# Altium schematic symbol library Centralize.SchLib: 1081 symbols (part 13 of 26)
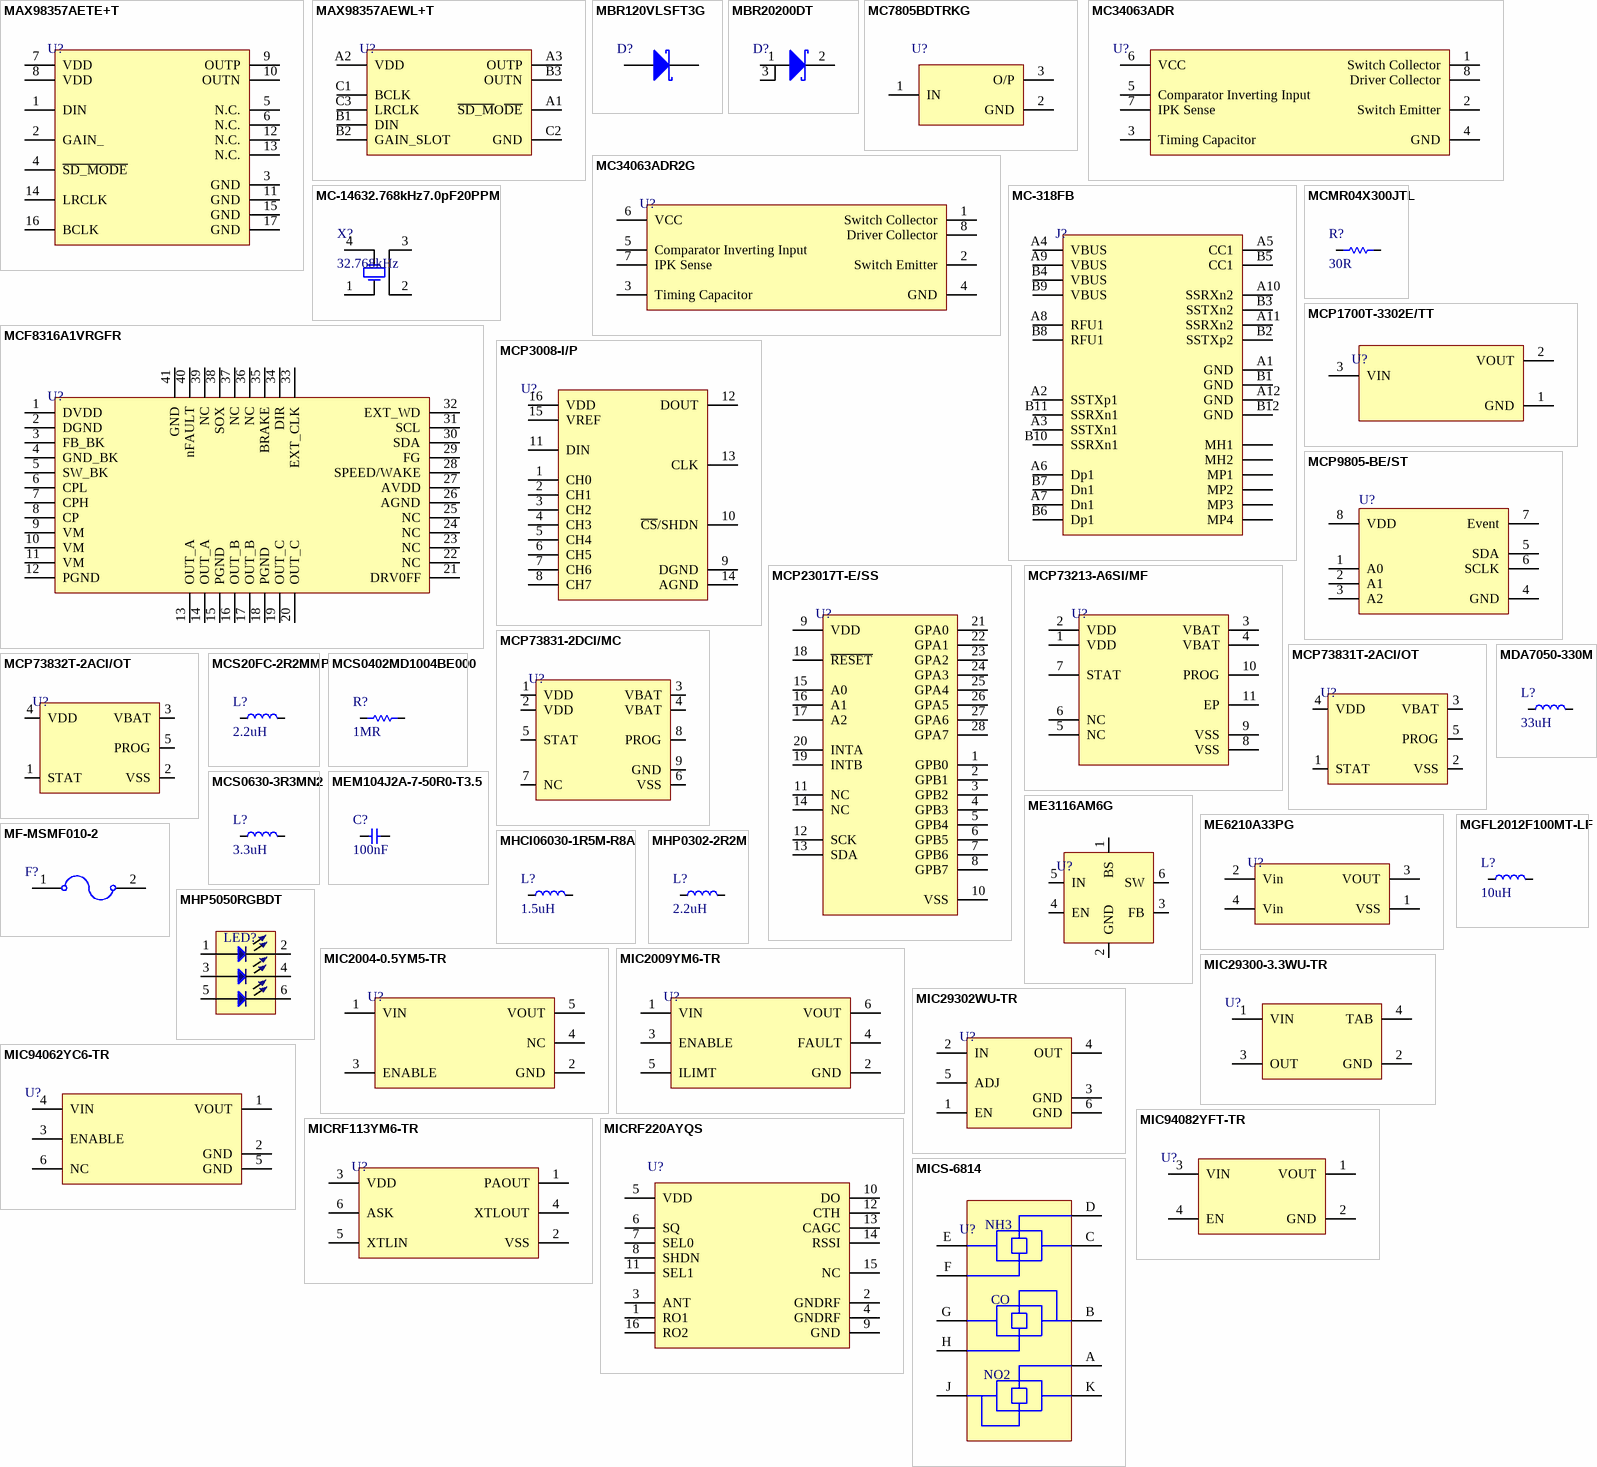
[diagram p59: symbols MAX98357AETE+T to MICS-6814]

## MICRF113YM6-TR
designator U?
SOT-23-6 RF Transceiver ICs ROHS; Manufacturer: Microchip; Manufacturer Part Number: MICRF113YM6-TR; Frequency: 450MHz; Data Rate: 10Kbps; Nominal Supply Current: 12.5mA; Max Supply Voltage: 3.6V; Min Supply Voltage: 1.8V; Operating Frequency: 300 MHz to 450 MHz; Output Power (dBm): 10dBm; Supplier 1: Future Electronics; RoHS: Yes; Category: Interface ICs; Stock 1: 12000; Pricing 1: 3000=0.90500 (USD); Case/Package: SOT-23-6; Number of Pins: 6; Min Operating Temperature: -40°C; Max Operating Temperature: 85°C; Package Quantity: 3000; Packaging: Tape and Reel; Current - Transmitting: 12.5mA; Series: -; Supply Current: 12.5mA; Radiation Hardening: No; RoHS Compliant: Yes; ComponentLink1URL: https://datasheet.ciiva.com/2802/micrf113-2802309.pdf?src-supplier=Digi-Key; ComponentLink1Description: https://datasheet.ciiva.com/2802/micrf113-2802309.pdf?src-supplier=Digi-Key; ComponentLink2URL: https://datasheet.ciiva.com/26913/getdatasheetpartid-313552-26913166.pdf?src-supplier=Verical; ComponentLink2Description: https://datasheet.ciiva.com/26913/getdatasheetpartid-313552-26913166.pdf?src-supplier=Verical; ComponentLink3URL: https://datasheet.ciiva.com/2802/micrf113-2802310.pdf?src-supplier=Digi-Key; ComponentLink3Description: https://datasheet.ciiva.com/2802/micrf113-2802310.pdf?src-supplier=Digi-Key; ComponentLink4URL: https://datasheet.ciiva.com/2802/micrf113-2802311.pdf?src-supplier=Digi-Key; ComponentLink4Description: https://datasheet.ciiva.com/2802/micrf113-2802311.pdf?src-supplier=Digi-Key; ComponentLink5URL: https://datasheet.ciiva.com/16217/micrf113-16217142.pdf?src-supplier=Future+Electronics; ComponentLink5Description: https://datasheet.ciiva.com/16217/micrf113-16217142.pdf?src-supplier=Future+Electronics; Supplier Part Number 1: 8229866; LCSC Part Number: C481380
footprint SOT-23-6
pins: 1 PAOUT, 2 VSS, 3 VDD, 4 XTLOUT, 5 XTLIN, 6 ASK

## MICRF220AYQS
designator U?
RF RX ASK/OOK 300-450MHZ 16QSOP; Manufacturer: Microchip; Manufacturer Part Number: MICRF220AYQS; Data Rate: 20Kbps; Nominal Supply Current: 4.3mA; Min Supply Voltage: 3V; Max Supply Voltage: 3.6V; Frequency: 450MHz; Sensitivity: -112.5dBm; Current - Receiving: 6mA; Bandwidth: 330kHz; Operating Frequency: 300 MHz to 450 MHz; Min Frequency: 300MHz; Item Type: IC; Supplier 1: Arrow Electronics; RoHS: Yes; Category: Interface ICs; Stock 1: 5131; Pricing 1: 1=2.15000 (USD); Mount: Surface Mount; Case/Package: QSOP; Number of Pins: 16; Min Operating Temperature: -40°C; Max Operating Temperature: 105°C; Package Quantity: 98; Packaging: Rail/Tube; Series: QwikRadio®; Supply Current: 4.3mA; Max Frequency: 450MHz; Length: 4.9mm; Width: 3.91mm; Height: 1.47mm; Depth: 3.91mm; Radiation Hardening: No; RoHS Compliant: Yes; REACH SVHC: No SVHC; Lead Free: Lead Free; ComponentLink1URL: https://datasheet.ciiva.com/2798/micrf220-2798468.pdf?src-supplier=Digi-Key; ComponentLink1Description: https://datasheet.ciiva.com/2798/micrf220-2798468.pdf?src-supplier=Digi-Key; ComponentLink2URL: https://datasheet.ciiva.com/30475/0900766b81133813-30475820.pdf?src-supplier=RSComponents; ComponentLink2Description: https://datasheet.ciiva.com/30475/0900766b81133813-30475820.pdf?src-supplier=RSComponents; ComponentLink3URL: https://datasheet.ciiva.com/1164/micrf220-1164232.pdf?src-supplier=Element14; ComponentLink3Description: https://datasheet.ciiva.com/1164/micrf220-1164232.pdf?src-supplier=Element14; Supplier Part Number 1: MICRF220AYQS; LCSC Part Number: C219772; ComponentLink4Description: LCSC; ComponentLink4URL: https://www.lcsc.com/product-detail/RF-Transceiver-ICs_Microchip-Tech-MICRF220AYQS_C219772.html
footprint 16-QSOP_
pins: 1 RO1, 2 GNDRF, 3 ANT, 4 GNDRF, 5 VDD, 6 SQ, 7 SEL0, 8 SHDN, 9 GND, 10 DO, 11 SEL1, 12 CTH, 13 CAGC, 14 RSSI, 15 NC, 16 RO2

## MICS-6814
designator U?
CO/NO2/NH3 Triple Gas Sensor Metaloxide Gas Detection Sensor SMD T/R; Manufacturer: Amphenol; Item Type: (CO) Sensor; Supplier 1: Arrow Electronics; Manufacturer Part Number: MICS-6814; RoHS: No; Category: Sensors; Stock 1: 100; Pricing 1: 1=10.8025, 10=10.7911 (USD); Supplier Part Number 1: MICS-6814; LCSC Part Number: C3659383
footprint MICS-6814
pins: A Rs2, B Rh1 RED/Rs1 RED, C Rh1 NH3, D Rs1 NH3, E Rh2 NH3, F Rs2 NH3, G Rh2 RED, H Rs2 RED, J Rh1 OX/Rs1 OX, K Rh2 OX
text: NH3; CO; NO2

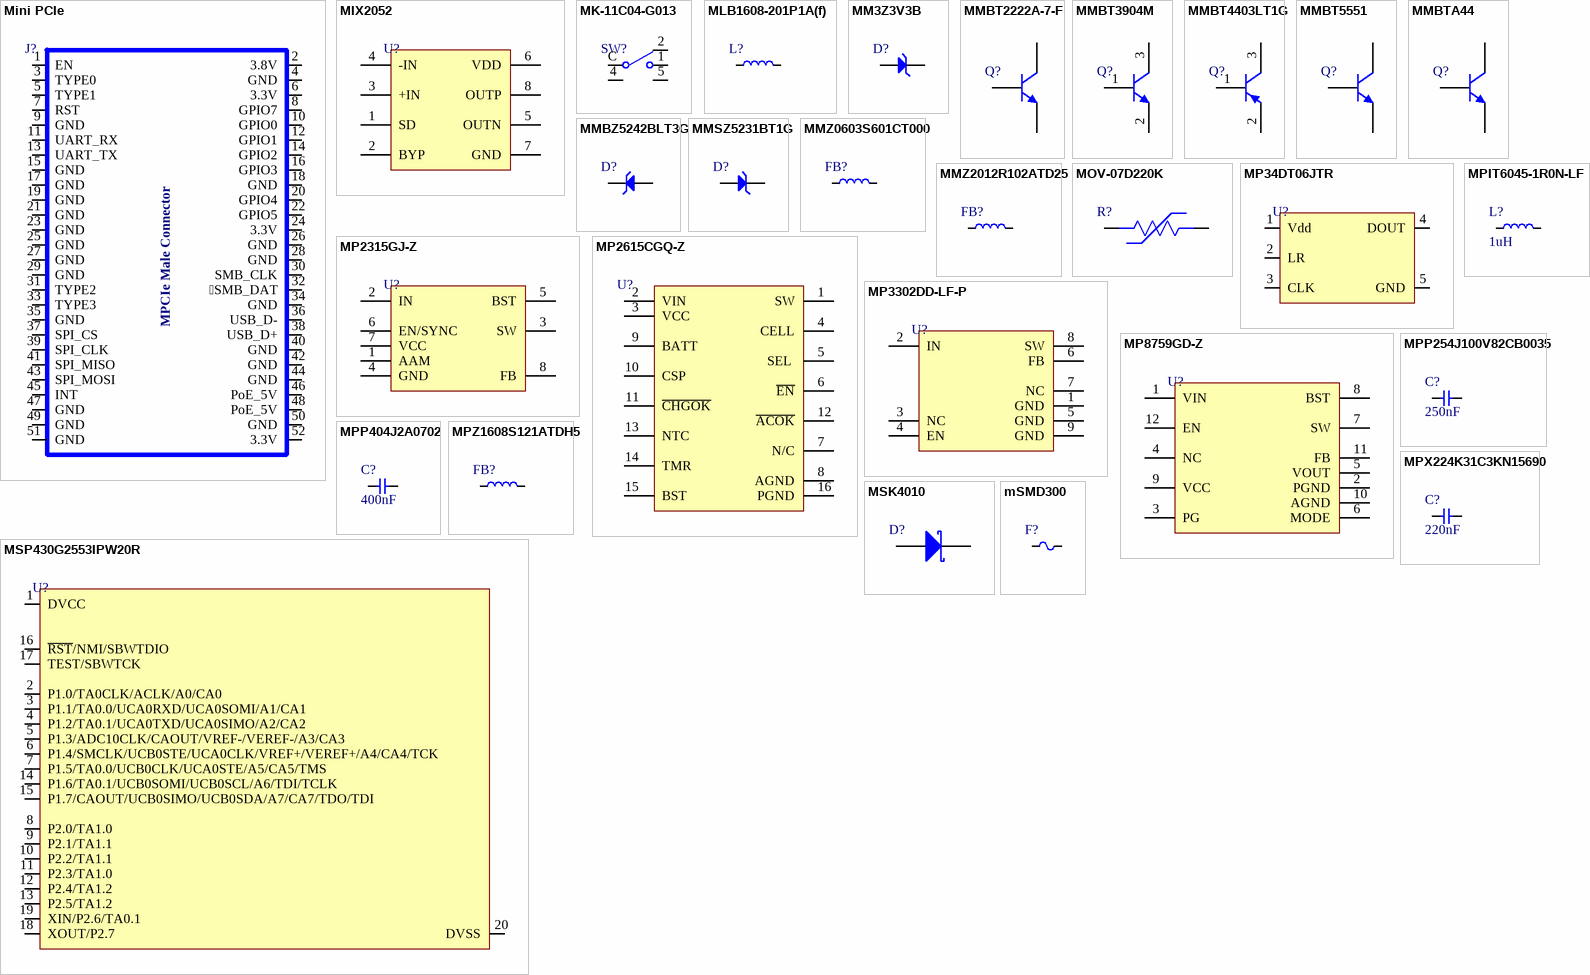
[diagram p16: symbols Mini PCIe to MSP430G2553IPW20R]

## Mini PCIe
designator J?
PCI Express Mini Card (Mini PCIe)
footprint Mini PCIE Pad
pins: 1 EN, 2 3.8V, 3 TYPE0, 4 GND, 5 TYPE1, 6 3.3V, 7 RST, 8 GPIO7, 9 GND, 10 GPIO0, 11 UART_RX, 12 GPIO1, 13 UART_TX, 14 GPIO2, 15 GND, 16 GPIO3, 17 GND, 18 GND, 19 GND, 20 GPIO4, 21 GND, 22 GPIO5, 23 GND, 24 3.3V, 25 GND, 26 GND, 27 GND, 28 GND, 29 GND, 30 SMB_CLK, 31 TYPE2, 32 SMB_DAT, 33 TYPE3, 34 GND, 35 GND, 36 USB_D-, 37 SPI_CS, 38 USB_D+, 39 SPI_CLK, 40 GND, 41 SPI_MISO, 42 GND, 43 SPI_MOSI, 44 GND, 45 INT, 46 PoE_5V, 47 GND, 48 PoE_5V, 49 GND, 50 GND, 51 GND, 52 3.3V
text: MPCIe Male Connector

## MIX2052
designator U?
SOP-8 Audio Power OpAmps ROHS; Manufacturer: MIXINNO; Manufacturer Part Number: MIX2052; Item Type: IC; Package: SOP-8; LCSC Part Number: C427090; ComponentLink1Description: LCSC; ComponentLink1URL: https://www.lcsc.com/product-detail/Audio-Power-OpAmps_MIXINNO-MIX2052_C427090.html
footprint SOP-8
pins: 1 SD, 2 BYP, 3 +IN, 4 -IN , 5 OUTN, 6 VDD, 7 GND, 8 OUTP

## MK-11C04-G013
designator SW?
Surface Mount 1A SPDT 6V Black 10000次 SMD Slide Switches ROHS; Manufacturer: G-Switch; Manufacturer Part Number: MK-11C04-G013; Package: SMD; LCSC Part Number: C778185; Item Type: Slide Switche; ComponentLink1Description: LCSC; ComponentLink1URL: https://www.lcsc.com/product-detail/Slide-Switches_G-Switch-MK-11C04-G013_C778185.html
footprint MK-11C04-G013
pins: 1, 2, 4 MP, 5 MP, C

## MLB1608-201P1A(f)
designator L?
200Ω @ 100MHz 1 1A 300mΩ 0603 Ferrite Beads; Manufacturer: Meled; Manufacturer Part Number: MLB1608-201P1A(f); Number of Lines: 1; Impedance @ Frequency: 200Ω @ 100MHz; Current Rating (Max): 1A; DC Resistance (DCR) (Max): 300mΩ; ComponentLink1Description: LCSC; ComponentLink1URL: https://www.lcsc.com/product-detail/Ferrite-Beads_Meled-MLB1608-201P1A-f_C45316.html; LCSC Part Number: C45316
footprint IND-0603 (1608 Metric) (0.063" L x 0.032" W (1.60mm x 0.80mm))
pins: 1, 2

## MM3Z3V3B
designator D?
DIODE ZENER 3.3V 200MW SOD323F; Manufacturer: ON Semiconductor / Fairchild; Manufacturer Part Number: MM3Z3V3B; Forward Voltage: 1V; Tolerance: 2%; Impedance: 89R; Max Reverse Leakage Current: 4.5uA; Test Current: 5mA; Element Configuration: Single; Supplier 1: Digi-Key; Stock 1: 473644; Pricing 1: 1=0.22, 10=0.18, 100=0.0956, 500=0.06288, 1000=0.04276 (USD); Mount: Surface Mount; Number of Pins: 2; Weight: 0.0276g; Min Operating Temperature: -65°C; Max Operating Temperature: 150°C; Packaging: Tape and Reel; Package Quantity: 1; Max Power Dissipation: 200mW; Zener Voltage: 3.3V; Voltage Tolerance: 2%; Power Dissipation: 200mW; Working Voltage: 3.3V; Peak Reverse Current: 4.5uA; Length: 1.3mm; Height: 1mm; Width: 1.7mm; Radiation Hardening: No; REACH SVHC: No SVHC; Lead Free: Lead Free; ComponentLink1URL: http://www.onsemi.com/pub/Collateral/MM3Z9V1B-D.pdf?src-supplier=Digi-Key; ComponentLink1Description: http://www.onsemi.com/pub/Collateral/MM3Z9V1B-D.pdf?src-supplier=Digi-Key; ComponentLink2URL: http://www.mouser.com/ds/2/149/MM3Z3V3B-187166.pdf?src-supplier=Mouser; ComponentLink2Description: http://www.mouser.com/ds/2/149/MM3Z3V3B-187166.pdf?src-supplier=Mouser; ComponentLink3URL: https://www.fairchildsemi.com/datasheets/MM/MM3Z9V1B.pdf?src-supplier=Avnet; ComponentLink3Description: https://www.fairchildsemi.com/datasheets/MM/MM3Z9V1B.pdf?src-supplier=Avnet; ComponentLink4URL: http://www.farnell.com/datasheets/1706525.pdf?src-supplier=Element14; ComponentLink4Description: http://www.farnell.com/datasheets/1706525.pdf?src-supplier=Element14; Supplier Part Number 1: MM3Z3V3BCT-ND; LCSC Part Number: C2978865
footprint SOD323F
pins: 1 A, 2 K

## MMBT2222A-7-F
designator Q?
TRANS NPN 40V 0.6A SMD SOT23-3; Manufacturer: Diodes; Manufacturer Part Number: MMBT2222A-7-F; Max Power Dissipation: 300mW; Collector Base Voltage (VCBO): 75V; Max Collector Current: 600mA; hFE Min: 100; Frequency: 300MHz; Number of Elements: 1; Emitter Base Voltage (VEBO): 6V; Collector Emitter Saturation Voltage: 1V; Power Dissipation: 350mW; Element Configuration: Single; Current: 1A; Item Type: Mosfet; Supplier 1: Digi-Key; Stock 1: 2471182; Pricing 1: 1=0.15, 10=0.134, 100=0.0729, 500=0.04486, 1000=0.03059 (USD); Mount: Surface Mount; Case/Package: SOT-23; Number of Pins: 3; Weight: 0.000282oz; Contact Plating: Matte,Tin; Min Operating Temperature: -55°C; Max Operating Temperature: 150°C; Packaging: Tape and Reel; Collector Emitter Voltage (VCEO): 40V; Polarity: NPN; Voltage Rating (DC): 40V; Package Quantity: 3000; Continuous Collector Current: 600mA; Collector Emitter Breakdown Voltage: 40V; Transition Frequency: 300MHz; Max Breakdown Voltage: 40V; Max Frequency: 300MHz; Termination: SMD/SMT; Gain Bandwidth Product: 300MHz; Current Rating: 600mA; Voltage: 40V; Length: 3.05mm; Height: 1mm; Width: 1.4mm; Radiation Hardening: No; Lead Free: Lead Free; REACH SVHC: No SVHC; ComponentLink1URL: http://www.diodes.com/datasheets/ds30041.pdf?src-supplier=Future+Electronics; ComponentLink1Description: http://www.diodes.com/datasheets/ds30041.pdf?src-supplier=Future+Electronics; ComponentLink2URL: http://www.diodes.com/datasheets/ds30041.pdf?src-supplier=Avnet; ComponentLink2Description: http://www.diodes.com/datasheets/ds30041.pdf?src-supplier=Avnet; ComponentLink3URL: https://www.verical.com/server-webapp/html/getDatasheet?partID=82692&src-supplier=Verical; ComponentLink3Description: https://www.verical.com/server-webapp/html/getDatasheet?partID=82692&src-supplier=Verical; ComponentLink4URL: https://www.diodes.com/assets/Datasheets/ds30041.pdf?src-supplier=Digi-Key; ComponentLink4Description: https://www.diodes.com/assets/Datasheets/ds30041.pdf?src-supplier=Digi-Key; ComponentLink5URL: http://www.diodes.com/datasheets/ds30041.pdf?src-supplier=Avnet+Europe; ComponentLink5Description: http://www.diodes.com/datasheets/ds30041.pdf?src-supplier=Avnet+Europe; ComponentLink6URL: http://www.diodes.com/datasheets/ds30041.pdf?src-supplier=Element14; ComponentLink6Description: http://www.diodes.com/datasheets/ds30041.pdf?src-supplier=Element14; Supplier Part Number 1: MMBT2222A-FDIDKR-ND; LCSC Part Number: C94515
footprint SOT-23
pins: 1 B, 2 E, 3 C

## MMBT3904M
designator Q?
40V 100mW 100@10mA,1V 200mA 300MHz 300mV@50mA,5mA NPN -55℃~+150℃@(Tj) SOT-723 Bipolar Transistors - BJT ROHS; Manufacturer: TECH PUBLIC; Manufacturer Part Number: MMBT3904M; Item Type: Mosfet; ComponentLink1Description: LCSC; ComponentLink1URL: https://www.lcsc.com/product-detail/Bipolar-Transistors-BJT_TECH-PUBLIC-MMBT3904M_C2923360.html; Package: SOT-723; LCSC Part Number: C2923360
footprint SOT-723
pins: 1 B, 2 E, 3 C

## MMBT4403LT1G
designator Q?
TRANS PNP 40V 600MA SOT23-3; Manufacturer: ON Semiconductor; Manufacturer Part Number: MMBT4403LT1G; Max Power Dissipation: 300mW; hFE Min: 30; Emitter Base Voltage (VEBO): 5V; Transition Frequency: 200MHz; Collector Emitter Saturation Voltage: -750mV; Element Configuration: Single; Voltage Rating (DC): -40V; Current Rating: -600mA; Collector-emitter Voltage-Max: 750mV; Number of Elements: 1; ComponentLink1URL: http://www.onsemi.com/pub/Collateral/MMBT4403LT1-D.PDF?src-supplier=Avnet; ComponentLink1Description: http://www.onsemi.com/pub/Collateral/MMBT4403LT1-D.PDF?src-supplier=Avnet; ComponentLink2URL: http://www.onsemi.com/pub/Collateral/MMBT4403LT1-D.PDF?src-supplier=Digi-Key; ComponentLink2Description: http://www.onsemi.com/pub/Collateral/MMBT4403LT1-D.PDF?src-supplier=Digi-Key; Supplier 1: Avnet; RoHS: Yes; Category: BJTs; Stock 1: 25249; Pricing 1: 1=0.14200, 10=0.09900, 100=0.05400, 500=0.04300 (USD); Case/Package: SOT-23-3; Number of Pins: 3; Contact Plating: Tin,Matte; Min Operating Temperature: -55°C; Max Operating Temperature: 150°C; Packaging: Tape and Reel; Polarity: PNP; Collector Emitter Breakdown Voltage: 40V; Package Quantity: 1; Collector Emitter Voltage (VCEO): 40V; Max Collector Current: 600mA; Collector Base Voltage (VCBO): 40V; Power Dissipation: 300mW; Gain Bandwidth Product: 200MHz; Max Frequency: 200MHz; Series: -; Frequency: 200MHz; Max Breakdown Voltage: 40V; Length: 3.04mm; Width: 1.4mm; Height: 1.01mm; Radiation Hardening: No; Lead Free: Lead Free; REACH SVHC: No SVHC; RoHS Compliant: Yes; ComponentLink3URL: https://datasheet.ciiva.com/4722/mmbt4403lt1-d-101652-4722132.pdf?src-supplier=Mouser; ComponentLink3Description: https://datasheet.ciiva.com/4722/mmbt4403lt1-d-101652-4722132.pdf?src-supplier=Mouser; ComponentLink4URL: https://datasheet.ciiva.com/15138/getdatasheetpartid-44367-15138750.pdf?src-supplier=Verical; ComponentLink4Description: https://datasheet.ciiva.com/15138/getdatasheetpartid-44367-15138750.pdf?src-supplier=Verical; ComponentLink5URL: https://datasheet.ciiva.com/14546/70099534-14546501.pdf?src-supplier=Allied+Electronics; ComponentLink5Description: https://datasheet.ciiva.com/14546/70099534-14546501.pdf?src-supplier=Allied+Electronics; ComponentLink6URL: https://datasheet.ciiva.com/7972/mmbt4403lt1-d-7972391.pdf?src-supplier=Element14; ComponentLink6Description: https://datasheet.ciiva.com/7972/mmbt4403lt1-d-7972391.pdf?src-supplier=Element14; ComponentLink7URL: https://datasheet.ciiva.com/11198/mmbt4403lt1-d-11198713.pdf?src-supplier=Avnet; ComponentLink7Description: https://datasheet.ciiva.com/11198/mmbt4403lt1-d-11198713.pdf?src-supplier=Avnet; ComponentLink8URL: https://datasheet.ciiva.com/16478/mmbt4403lt1-d-16478554.pdf?src-supplier=Avnet+Asia; ComponentLink8Description: https://datasheet.ciiva.com/16478/mmbt4403lt1-d-16478554.pdf?src-supplier=Avnet+Asia; ComponentLink9URL: https://datasheet.ciiva.com/976/mmbt4403lt1-d-976347.pdf?src-supplier=Digi-Key; ComponentLink9Description: https://datasheet.ciiva.com/976/mmbt4403lt1-d-976347.pdf?src-supplier=Digi-Key; ComponentLink10URL: https://datasheet.ciiva.com/16396/mmbt4403lt1-d-16396635.pdf?src-supplier=Future+Electronics; ComponentLink10Description: https://datasheet.ciiva.com/16396/mmbt4403lt1-d-16396635.pdf?src-supplier=Future+Electronics; ComponentLink11URL: https://datasheet.ciiva.com/976/mmbt4403lt1-d-976348.pdf?src-supplier=Digi-Key; ComponentLink11Description: https://datasheet.ciiva.com/976/mmbt4403lt1-d-976348.pdf?src-supplier=Digi-Key; ComponentLink12URL: https://datasheet.ciiva.com/976/mmbt4403lt1-d-976349.pdf?src-supplier=Digi-Key; ComponentLink12Description: https://datasheet.ciiva.com/976/mmbt4403lt1-d-976349.pdf?src-supplier=Digi-Key; ComponentLink13URL: https://datasheet.ciiva.com/25998/mmbt4403lt1-d-25998110.pdf?src-supplier=Avnet+Europe; ComponentLink13Description: https://datasheet.ciiva.com/25998/mmbt4403lt1-d-25998110.pdf?src-supplier=Avnet+Europe; Supplier Part Number 1: 88H4792; LCSC Part Number: C78864
footprint sot-23
pins: 1 B, 2 E, 3 C

## MMBT5551
designator Q?
TRANS NPN 160V 0.6A SOT-23; Manufacturer: ON Semiconductor; Manufacturer Part Number: MMBT5551LT1G; Max Power Dissipation: 225mW; Max Collector Current: 600mA; Collector Base Voltage (VCBO): 180V; Emitter Base Voltage (VEBO): 6V; Element Configuration: Single; hFE Min: 80; Power Dissipation: 300mW; Number of Elements: 1; Collector Emitter Saturation Voltage: 150mV; Collector-emitter Voltage-Max: 200mV; Item Type: Transister; Supplier 1: Digi-Key; RoHS: Yes; Category: BJTs; Pricing 1: 1=0.22000, 10=0.17700, 100=0.09370, 500=0.06162, 1000=0.04190 (USD); Case/Package: SOT-23-3; Number of Pins: 3; Weight: 0.01lb; Contact Plating: Tin,Matte; Min Operating Temperature: -55°C; Max Operating Temperature: 150°C; Packaging: Tape and Reel; Collector Emitter Voltage (VCEO): 160V; Polarity: NPN; Package Quantity: 1; Collector Emitter Breakdown Voltage: 160V; Current Rating: 600mA; Voltage Rating (DC): 160V; Max Breakdown Voltage: 160V; Series: -; Length: 2.9mm; Width: 1.3mm; Height: 0.94mm; Radiation Hardening: No; Lead Free: Lead Free; REACH SVHC: No SVHC; RoHS Compliant: Yes; Supplier Part Number 1: MMBT5551LT1GOSDKR-ND; LCSC Part Number: C909756; ComponentLink14Description: LCSC; ComponentLink14URL: https://www.lcsc.com/product-detail/Bipolar-Transistors-BJT_Jiangsu-Changjing-Electronics-Technology-Co-Ltd-MMBT5551_C2145.html
footprint SOT-23 (TRANS NPN 40V 0.6A SOT23)
pins: 1 B, 2 E, 3 C

## MMBTA44
designator Q?
400V 350mW 300mA NPN SOT-23 Bipolar Transistors - BJT ROHS; Manufacturer: Foshan; Manufacturer Part Number: MMBTA44; Package: SOT-23; ComponentLink1Description: LCSC; ComponentLink1URL: https://lcsc.com/product-detail/Bipolar-Transistors-BJT_Foshan-Blue-Rocket-Elec-MMBTA44_C305465.html; LCSC Part Number: C9991
footprint sot-23
pins: 1 B, 2 E, 3 C

## MMBZ5242BLT3G
designator D?
DIODE ZENER 12V 225MW SOT23-3; Manufacturer: ON Semiconductor; Manufacturer Part Number: MMBZ5242BLT3G; Impedance: 30R; Voltage Tolerance: 5%; Power Dissipation: 300mW; Max Reverse Leakage Current: 1uA; Element Configuration: Single; Supplier 1: Digi-Key; Stock 1: 9410; Pricing 1: 1=0.16, 10=0.143, 100=0.0779, 500=0.04792, 1000=0.03267, 2000=0.02777, 5000=0.02505 (USD); Case/Package: SOT-23-3; Number of Pins: 3; Min Operating Temperature: -65°C; Max Operating Temperature: 150°C; Package Quantity: 10000; Packaging: Tape and Reel; Zener Voltage: 12V; Max Power Dissipation: 225mW; Tolerance: 5%; Lead Free: Lead Free; RoHS Compliant: Yes; ComponentLink1URL: http://www.mouser.com/ds/2/308/MMBZ5221BLT1-D-79158.pdf?src-supplier=Mouser; ComponentLink1Description: http://www.mouser.com/ds/2/308/MMBZ5221BLT1-D-79158.pdf?src-supplier=Mouser; Supplier Part Number 1: MMBZ5242BLT3GOSCT-ND; LCSC Part Number: C896784
footprint sot-23
pins: 1 A, 3 K

## MMSZ5231BT1G
designator D?
DIODE ZENER 5.1V 500MW SOD123; Manufacturer: ON Semiconductor; Manufacturer Part Number: MMSZ5231BT1G; Material: Plastic; Max Reverse Leakage Current: 5uA; Impedance: 17R; Tolerance: 5%; Zener Current: 10mA; Test Current: 20mA; Forward Voltage: 900mV; Breakdown Voltage: 5.36V; Supplier 1: Allied Electronics; RoHS: Yes; Category: Zener Diodes; Case/Package: SOD-123-2; Pins: 2; Min Operating Temperature: -55°C; Max Operating Temperature: 150°C; Max Power Dissipation: 500mW; Packaging: Tape and Reel; Zener Voltage: 5.1V; Package Quantity: 3000; Series: Automotive, AEC-Q101; Voltage Tolerance: 5%; Power Dissipation: 500mW; Working Voltage: 5.1V; Max Reverse Current: 5uA; Voltage Rating (DC): 5.1V; Power Rating: 500mW; Length: 2.69mm; Width: 1.6mm; Height: 1.12mm; RoHS Compliant: Yes; Lead Free: Lead Free; Reach SVHC Compliant: No; ComponentLink1URL: https://datasheet.ciiva.com/23815/1708301-23815376.pdf?src-supplier=Newark; ComponentLink1Description: https://datasheet.ciiva.com/23815/1708301-23815376.pdf?src-supplier=Newark; ComponentLink2URL: https://datasheet.ciiva.com/22626/1708301-22626967.pdf?src-supplier=Element14; ComponentLink2Description: https://datasheet.ciiva.com/22626/1708301-22626967.pdf?src-supplier=Element14; ComponentLink3URL: https://datasheet.ciiva.com/4731/mmsz5221bt1-d-4731452.pdf?src-supplier=Mouser; ComponentLink3Description: https://datasheet.ciiva.com/4731/mmsz5221bt1-d-4731452.pdf?src-supplier=Mouser; ComponentLink4URL: https://datasheet.ciiva.com/16200/mmsz5221bt1-d-16200104.pdf?src-supplier=Future+Electronics; ComponentLink4Description: https://datasheet.ciiva.com/16200/mmsz5221bt1-d-16200104.pdf?src-supplier=Future+Electronics; ComponentLink5URL: https://datasheet.ciiva.com/894/mmsz5221bt1-d-894882.pdf?src-supplier=Digi-Key; ComponentLink5Description: https://datasheet.ciiva.com/894/mmsz5221bt1-d-894882.pdf?src-supplier=Digi-Key; ComponentLink6URL: https://datasheet.ciiva.com/894/mmsz5221bt1-d-894883.pdf?src-supplier=Digi-Key; ComponentLink6Description: https://datasheet.ciiva.com/894/mmsz5221bt1-d-894883.pdf?src-supplier=Digi-Key; ComponentLink7URL: https://datasheet.ciiva.com/894/mmsz5221bt1-d-894881.pdf?src-supplier=Digi-Key; ComponentLink7Description: https://datasheet.ciiva.com/894/mmsz5221bt1-d-894881.pdf?src-supplier=Digi-Key; Supplier Part Number 1: 70099546; LCSC Part Number: C66198; Item Type: Diode
footprint SOD-123
pins: 1 A, 2 K

## MMZ0603S601CT000
designator FB?
FERRITE BEAD 600 OHM 0201 1LN; Manufacturer: TDK; Manufacturer Part Number: MMZ0603S601CT000; Impedance: 600R; Tolerance: 25%; DC Resistance (DCR): 1.45R; Max DC Current: 100mA; Item Type: Inductor; Supplier 1: Digi-Key; RoHS: Yes; Category: Inductors; Stock 1: 1540; Pricing 1: 1=0.12000, 10=0.09900, 25=0.07680, 50=0.06380, 100=0.05500, 250=0.04400, 500=0.03960, 1000=0.03300, 5000=0.03080 (USD); Mount: Surface Mount; Case/Package: 0201; Core Material: Ferrite; Case Code (Metric): 0603; Case Code (Imperial): 0201; Packaging: Cut Tape; Package Quantity: 15000; Current Rating: 100mA; Length: 0.024inch; Width: 0.012inch; Height: 0.013inch; REACH SVHC: No SVHC; Lead Free: Lead Free; RoHS Compliant: Yes; ComponentLink1URL: https://datasheet.ciiva.com/46381/1795294-46381669.pdf?src-supplier=Element14; ComponentLink1Description: https://datasheet.ciiva.com/46381/1795294-46381669.pdf?src-supplier=Element14; ComponentLink2URL: https://datasheet.ciiva.com/46634/beads-commercial-signal-mmz-en-46634390.pdf?src-supplier=Digi-Key; ComponentLink2Description: https://datasheet.ciiva.com/46634/beads-commercial-signal-mmz-en-46634390.pdf?src-supplier=Digi-Key; ComponentLink3URL: https://datasheet.ciiva.com/48682/beads-commercial-signal-mmz-en-48682603.pdf?src-supplier=Avnet; ComponentLink3Description: https://datasheet.ciiva.com/48682/beads-commercial-signal-mmz-en-48682603.pdf?src-supplier=Avnet; ComponentLink4URL: https://datasheet.ciiva.com/46634/beads-commercial-signal-mmz-en-46634381.pdf?src-supplier=Digi-Key; ComponentLink4Description: https://datasheet.ciiva.com/46634/beads-commercial-signal-mmz-en-46634381.pdf?src-supplier=Digi-Key; Supplier Part Number 1: 445-2146-1-ND; LCSC Part Number: C275404; ComponentLink5Description: LCSC; ComponentLink5URL: https://www.lcsc.com/product-detail/Ferrite-Beads_TDK-MMZ0603S601CT000_C275404.html
footprint IND-0201
pins: 1, 2

## MMZ2012R102ATD25
designator FB?
FERRITE BEAD 1K OHM 0805 1LN; Manufacturer: TDK; Manufacturer Part Number: MMZ2012R102ATD25; Number of Lines: 1; Max Current Rating: 500mA; DC Resistance (DCR): 300mR; Impedance: 1kR; Tolerance: 25%; Test Frequency: 100MHz; Supplier 1: Digi-Key; RoHS: Yes; Category: Ferrite Beads and Chips; Stock 1: 2942; Pricing 1: 1=0.11000, 10=0.09200, 25=0.08280, 50=0.06080, 100=0.05240, 250=0.04140, 500=0.03496, 1000=0.02944 (USD); Mount: Surface Mount; Case/Package: 0805; Case Code (Metric): 2012; Case Code (Imperial): 0805; Weight: 0.000194oz; Min Operating Temperature: -55°C; Max Operating Temperature: 125°C; Package Quantity: 4000; Packaging: Tape and Reel; Termination: SMD/SMT; Max DC Current: 500mA; Length: 0.079inch; Width: 0.049inch; Height: 0.041inch; Ratings: AEC-Q200; RoHS Compliant: Yes; ComponentLink1URL: http://www.mouser.com/ds/2/400/beads_automotive_signal_mmz_en-469244.pdf?src-supplier=Mouser; ComponentLink1Description: http://www.mouser.com/ds/2/400/beads_automotive_signal_mmz_en-469244.pdf?src-supplier=Mouser; ComponentLink2URL: https://product.tdk.com/info/en/catalog/datasheets/beads_automotive_signal_mmz2012_en.pdf?src-supplier=Digi-Key; ComponentLink2Description: https://product.tdk.com/info/en/catalog/datasheets/beads_automotive_signal_mmz2012_en.pdf?src-supplier=Digi-Key; Supplier Part Number 1: 445-MMZ2012R102ATD25CT-ND; LCSC Part Number: C307765; Item Type: Ferrite Bead
footprint Ind-0805 (Inductor 0805)
pins: 1, 2

## MOV-07D220K
designator R?
VARISTOR 22V 250A DISC 7MM; Manufacturer: Bourns; Manufacturer Part Number: MOV-07D220K; Capacitance: 2.3nF; Voltage Rating (DC): 24V; Tolerance: 10%; Max Voltage Rating (AC): 14V; Max Voltage Rating (DC): 18V; Number of Circuits: 1; Energy: 1.1J; Clamping Voltage: 43V; Clamping Current: 2.5A; Min Varistor Voltage: 20V; Lead/Base Style: Radial; Item Type: Resistor; Supplier 1: Digi-Key; RoHS: Yes; Category: Varistors; Stock 1: 292; Pricing 1: 1=0.43000, 10=0.30800, 25=0.23920, 100=0.18130, 250=0.12824, 500=0.10260, 1000=0.07866, 2500=0.06840, 5000=0.06156 (USD); Mount: Through Hole,Radial; Case/Package: Radial; Min Operating Temperature: -40°C; Max Operating Temperature: 85°C; Packaging: Bulk; Max Surge Current: 250A; Package Quantity: 2000; Varistor Voltage: 22V; Max Varistor Voltage: 24V; Series: -; Diameter: 7mm; Width: 6.8mm; Lead Pitch: 5mm; Radiation Hardening: No; RoHS Compliant: Yes; Supplier Part Number 1: MOV-07D220K-ND; LCSC Part Number: C1528486; ComponentLink4Description: LCSC; ComponentLink4URL: https://www.lcsc.com/product-detail/Varistors_BOURNS-MOV-07D220K_C1528486.html
footprint MOV-07D220K_
pins: 1, 2

## MP34DT06JTR
designator U?
MIC MEMS DIGITAL PDM OMNI -26DB; Manufacturer: STMicroelectronics; Manufacturer Part Number: MP34DT06JTR; Shape: Rectangular; Direction: Omnidirectional; Voltage Rating: 1.8V; Operating Supply Current: 650uA; Item Type: Microphone; Supplier 1: Mouser; RoHS: Yes; Category: Microphones; Stock 1: 6064; Pricing 1: 1=2.31, 10=1.92, 50=1.6, 100=1.51, 1000=1.24, 10000=1.23 (USD); Packaging: Cut Tape; Termination: Solder; Series: -; RoHS Compliant: Yes; ComponentLink1URL: http://www.farnell.com/datasheets/2710895.pdf?src-supplier=Farnell; ComponentLink1Description: http://www.farnell.com/datasheets/2710895.pdf?src-supplier=Farnell; ComponentLink2URL: https://www.st.com/resource/en/datasheet/mp34dt06j.pdf?src-supplier=Digi-Key; ComponentLink2Description: https://www.st.com/resource/en/datasheet/mp34dt06j.pdf?src-supplier=Digi-Key; ComponentLink3URL: http://www.farnell.com/datasheets/2710895.pdf?src-supplier=Newark; ComponentLink3Description: http://www.farnell.com/datasheets/2710895.pdf?src-supplier=Newark; ComponentLink4URL: http://www.farnell.com/datasheets/2710895.pdf?src-supplier=Element14; ComponentLink4Description: http://www.farnell.com/datasheets/2710895.pdf?src-supplier=Element14; Supplier Part Number 1: 511-MP34DT06JTR; LCSC Part Number: C503097
footprint MP34DT06JTR
pins: 1 Vdd, 2 LR, 3 CLK, 4 DOUT, 5 GND

## MP2315GJ-Z
designator U?
IC REG BUCK ADJ 3A TSOT23-8; Manufacturer: Monolithic Power Systems; Manufacturer Part Number: MP2315GJ-Z; Switching Frequency: 500kHz; Number of Outputs: 1; Output Voltage: 22.8V; Min Input Voltage: 4.5V; Max Input Voltage: 24V; Min Output Voltage: 800mV; Synchronous Rectifier: Yes; Output Type: Adjustable; Output Configuration: Positive; Supplier 1: Mouser; RoHS: Yes; Category: Voltage Regulators - Switching; Stock 1: 517; Pricing 1: 1=2.68000, 10=2.42000, 50=2.28000, 100=1.95000, 1000=1.33000, 10000=1.24000 (USD); Mount: Surface Mount; Case/Package: SOT-23-8; Number of Pins: 8; Contact Plating: Tin,Matte; Min Operating Temperature: -40°C; Max Operating Temperature: 125°C; Max Output Current: 3A; Packaging: Tape and Reel; Max Output Voltage: 22.8V; Output Current: 3A; Operating Supply Voltage: 24V; Radiation Hardening: No; Lead Free: Lead Free; RoHS Compliant: Yes; ComponentLink1URL: https://www.monolithicpower.com/pub/media/document/MP2315_r1.01.pdf?src-supplier=Digi-Key; ComponentLink1Description: https://www.monolithicpower.com/pub/media/document/MP2315_r1.01.pdf?src-supplier=Digi-Key; ComponentLink2URL: http://www.monolithicpower.com/Lists/Product_Synchronous%20Switcher_5717/DispForm.aspx?ID=235&src-supplier=Avnet; ComponentLink2Description: http://www.monolithicpower.com/Lists/Product_Synchronous%20Switcher_5717/DispForm.aspx?ID=235&src-supplier=Avnet; ComponentLink3URL: http://www.monolithicpower.com/DesktopModules/DocumentManage/API/Document/getDocument?id=595&src-supplier=Digi-Key; ComponentLink3Description: http://www.monolithicpower.com/DesktopModules/DocumentManage/API/Document/getDocument?id=595&src-supplier=Digi-Key; Supplier Part Number 1: 946-MP2315GJZ; Item Type: IC
footprint TSOT-23-8_
pins: 1 AAM, 2 IN, 3 SW, 4 GND, 5 BST, 6 EN/SYNC, 7 VCC, 8 FB

## MP2615CGQ-Z
designator U?
2.1A, 1- OR 2-CELL LI-ION BATTER; Manufacturer: Monolithic Power Systems; Manufacturer Part Number: MP2615CGQ-Z; Item Type: IC; Supplier 1: Digi-Key; RoHS: No; Category: Uncategorized; Stock 1: 5000; Pricing 1: 1=2.38000, 10=2.13500, 25=2.01400, 100=1.71590, 250=1.61120, 500=1.40980, 1000=1.16812, 2500=1.14000 (USD); Supplier Part Number 1: 1589-MP2615CGQ-ZCT-ND
footprint 16-QFN (3x3) (MP2615CGQ-Z)
pins: 1 SW, 2 VIN, 3 VCC, 4 CELL, 5 SEL , 6 ~{EN}, 7 N/C, 8 AGND, 9 BATT, 10 CSP, 11 ~{CHGOK}, 12 ~{ACOK}, 13 NTC, 14 TMR, 15 BST, 16 PGND

## MP3302DD-LF-P
designator U?
IC LED DRVR RGLTR SGL WR 8QFN; Manufacturer: Monolithic Power Systems; Manufacturer Part Number: MP3302DD-LF-P; Topology: Boost; Dimming: Single-Wire; Number of Outputs: 1; Max Supply Voltage: 6V; Output Voltage: 36V; Output Current per Channel: 1.33A; Frequency: 1.3MHz; Max Supply Current: 850uA; Power Dissipation: 1.56W; Supplier 1: Digi-Key; RoHS: Yes; Category: LED Drivers; Stock 1: 521; Pricing 1: 1=2.97000, 10=2.66600, 25=2.52000, 100=2.18400, 250=2.07200 (USD); Mount: Surface Mount; Case/Package: QFN; Min Operating Temperature: -40°C; Max Operating Temperature: 125°C; Packaging: Tape and Reel; Package Quantity: 500; ComponentLink1URL: http://www.mouser.com/ds/2/277/MP3302_r0.98-472618.pdf?src-supplier=Mouser; ComponentLink1Description: http://www.mouser.com/ds/2/277/MP3302_r0.98-472618.pdf?src-supplier=Mouser; ComponentLink2URL: http://www.monolithicpower.com/DesktopModules/DocumentManage/API/Document/GetDocument?id=1224&src-supplier=Digi-Key; ComponentLink2Description: http://www.monolithicpower.com/DesktopModules/DocumentManage/API/Document/GetDocument?id=1224&src-supplier=Digi-Key; Supplier Part Number 1: 1589-1159-1-ND; LCSC Part Number: *; Item Type: IC
footprint 8-QFN (2x3)
pins: 1 GND, 2 IN, 3 NC, 4 EN, 5 GND, 6 FB, 7 NC, 8 SW, 9 GND

## MP8759GD-Z
designator U?
IC REG BUCK ADJUSTABLE 8A 12QFN; Manufacturer: Monolithic Power Systems; Manufacturer Part Number: MP8759GD-Z; Output Voltage: 600mV; Number of Outputs: 1; Max Input Voltage: 26V; Switching Frequency: 700kHz; Min Input Voltage: 4.5V; Max Output Current: 10A; Supplier 1: Digi-Key; RoHS: Yes; Category: Voltage Regulators - Switching; Stock 1: 100; Pricing 1: 1=2.85000, 10=2.55600, 25=2.41160, 100=2.05460, 250=1.92920, 500=1.68804, 1000=1.39867, 2500=1.36500 (USD); Mount: Surface Mount; Case/Package: QFN; Number of Pins: 14; Contact Plating: Tin,Matte; Min Operating Temperature: -40°C; Max Operating Temperature: 125°C; Operating Supply Voltage: 26V; Output Type: Adjustable; RoHS Compliant: Yes; ComponentLink1URL: https://www.monolithicpower.com/pub/media/document/MP8759_r1.1.pdf?src-supplier=Digi-Key; ComponentLink1Description: https://www.monolithicpower.com/pub/media/document/MP8759_r1.1.pdf?src-supplier=Digi-Key; Supplier Part Number 1: 1589-1736-1-ND; LCSC Part Number: *; Item Type: IC
footprint 12-QFN (2x3)_
pins: 1 VIN, 2 PGND, 3 PG, 4 NC, 5 VOUT, 6 MODE, 7 SW, 8 BST, 9 VCC, 10 AGND, 11 FB, 12 EN

## MPIT6045-1R0N-LF
designator L?, comment 1uH
5.15A 1uH ±30% SMD Power Inductors ROHS; Manufacturer: microgate; Manufacturer Part Number: MPIT6045-1R0N-LF; Package: SMD; LCSC Part Number: C486570; Item Type: INductor; ComponentLink1Description: LCSC; ComponentLink1URL: https://www.lcsc.com/product-detail/Power-Inductors_microgate-MPIT6045-1R0N-LF_C486570.html
footprint MPIT6045-1R0N-LF
pins: 1, 2

## MPP254J100V82CB0035
designator C?, comment 250nF
250nF ±5% 100V Plugin,P=7.5mm Polypropylene Film Capacitors (CBB) ROHS; Manufacturer: KNSCHA; Manufacturer Part Number: MPP254J100V82CB0035; Package: Plugin,P=7.5mm; LCSC Part Number: C3034846; ComponentLink1Description: LCSC; ComponentLink1URL: https://www.lcsc.com/product-detail/Polypropylene-Film-Capacitors-CBB_KNSCHA-MPP254J100V82CB0035_C3034846.html; Item Type: Capacitor
footprint MPP254J100V82CB0035
pins: 1, 2

## MPP404J2A0702
designator C?, comment 400nF
400nF ±5% 100V Plugin,P=7.5mm Polypropylene Film Capacitors (CBB) ROHS; Manufacturer: KYET; Manufacturer Part Number: MPP404J2A0702; Package: Plugin,P=7.5mm; LCSC Part Number: C3019095; Item Type: Capacitor; ComponentLink1Description: LCSC; ComponentLink1URL: https://www.lcsc.com/product-detail/Polypropylene-Film-Capacitors-CBB_span-style-background-color-ff0-KYET-span-MPP404J2A0702_C3019095.html
footprint MPP404J2A0702
pins: 1, 2

## MPX224K31C3KN15690
designator C?, comment 220nF
220nF ±10% X2 Plugin,P=10mm Suppression Capacitors ROHS; Manufacturer: KNSCHA; Manufacturer Part Number: MPX224K31C3KN15690; Package: Plugin,P=10mm; LCSC Part Number: C504197; Item Type: Suppression Capacitor; ComponentLink1Description: LCSC; ComponentLink1URL: https://www.lcsc.com/product-detail/Suppression-Capacitors_KNSCHA-MPX224K31C3KN15690_C504197.html
footprint MPX224K31C3KN15690
pins: 1, 2

## MPZ1608S121ATDH5
designator FB?
FERRITE BEAD 120 OHM 0603 1LN; Manufacturer: TDK; Manufacturer Part Number: MPZ1608S121ATDH5; Number of Lines: 1; Max Current Rating: 2A; DC Resistance (DCR): 45mR; Impedance: 120R; Tolerance: 25%; Test Frequency: 100MHz; Supplier 1: Digi-Key; RoHS: Yes; Category: Ferrite Beads and Chips; Pricing 1: 1=0.11000, 10=0.08600, 25=0.07720, 50=0.05660, 100=0.04890, 250=0.03860, 500=0.03260, 1000=0.02746 (USD); Mount: Surface Mount; Case/Package: 0603; Case Code (Metric): 1608; Case Code (Imperial): 0603; Weight: 7.1E-05oz; Min Operating Temperature: -55°C; Max Operating Temperature: 125°C; Package Quantity: 4000; Packaging: Tape and Reel; Termination: SMD/SMT; Max DC Current: 2A; Length: 0.063inch; Width: 0.031inch; Height: 0.03inch; Ratings: AEC-Q200; RoHS Compliant: Yes; ComponentLink1URL: https://media.digikey.com/pdf/Data%20Sheets/TDK%20PDFs/MPZ_Series_Br.pdf?src-supplier=Digi-Key; ComponentLink1Description: https://media.digikey.com/pdf/Data%20Sheets/TDK%20PDFs/MPZ_Series_Br.pdf?src-supplier=Digi-Key; ComponentLink2URL: http://www.mouser.com/ds/2/400/eads_commercial_power_mpz1608_en-923650.pdf?src-supplier=Mouser; ComponentLink2Description: http://www.mouser.com/ds/2/400/eads_commercial_power_mpz1608_en-923650.pdf?src-supplier=Mouser; ComponentLink3URL: https://product.tdk.com/info/en/catalog/datasheets/beads_automotive_power_mpz1608_en.pdf?src-supplier=Digi-Key; ComponentLink3Description: https://product.tdk.com/info/en/catalog/datasheets/beads_automotive_power_mpz1608_en.pdf?src-supplier=Digi-Key; Supplier Part Number 1: 445-172891-6-ND; LCSC Part Number: C307770
footprint IND-0603 (1608 Metric) (0.063" L x 0.032" W (1.60mm x 0.80mm))
pins: 1, 2

## MSK4010
designator D?
SOD-523 Schottky Barrier Diodes (SBD) ROHS; Manufacturer: Tak Cheong; Manufacturer Part Number: MSK4010; Value: Custom; Item Type: Diode; Pakage: SOD-523; ComponentLink1Description: LCSC; ComponentLink1URL: https://lcsc.com/product-detail/Schottky-Barrier-Diodes-SBD_Tak-Cheong-MSK4010_C968723.html; LCSC Part Number: C968723
footprint SOD-523 (SOD-523 Schottky Barrier Diodes (SBD) ROHS)
pins: 1 A, 2 K

## mSMD300
designator F?
8V 3A 100A 5A 1812 Resettable Fuses ROHS; Manufacturer: TECHFUSE; Manufacturer Part Number: mSMD300; Footprint: 1812; ComponentLink1Description: LCSC; ComponentLink1URL: https://www.lcsc.com/product-detail/Resettable-Fuses_TECHFUSE-mSMD300_C69689.html; LCSC Part Number: C69689
footprint Fuse-1812_
pins: 1, 2

## MSP430G2553IPW20R
designator U?
IC MCU 16BIT 16KB FLASH 20TSSOP; Manufacturer: Texas Instruments; Manufacturer Part Number: MSP430G2553IPW20R; Supplier: Arrow Electronics; Supplier Part Number: MSP430G2553IPW20R; RoHS: Yes; Category: Microcontrollers; Stock: 2433; Pricing: 1=2.9441, 10=2.6437, 25=2.4938, 100=2.1248, 250=1.9952, 500=1.7458, 1000=1.4465, 2000=1.4079 (USD); ComponentLink1URL: https://datasheet.ciiva.com/6659/msp430g2553-6659151.pdf?src-supplier=Digi-Key; ComponentLink1Description: https://datasheet.ciiva.com/6659/msp430g2553-6659151.pdf?src-supplier=Digi-Key; LCSC Part Number: C53923; Item Type: IC
footprint TSSOP-20
pins: 1 DVCC, 2 P1.0/TA0CLK/ACLK/A0/CA0, 3 P1.1/TA0.0/UCA0RXD/UCA0SOMI/A1/CA1, 4 P1.2/TA0.1/UCA0TXD/UCA0SIMO/A2/CA2, 5 P1.3/ADC10CLK/CAOUT/VREF-/VEREF-/A3/CA3, 6 P1.4/SMCLK/UCB0STE/UCA0CLK/VREF+/VEREF+/A4/CA4/TCK, 7 P1.5/TA0.0/UCB0CLK/UCA0STE/A5/CA5/TMS, 8 P2.0/TA1.0, 9 P2.1/TA1.1, 10 P2.2/TA1.1, 11 P2.3/TA1.0, 12 P2.4/TA1.2, 13 P2.5/TA1.2, 14 P1.6/TA0.1/UCB0SOMI/UCB0SCL/A6/TDI/TCLK, 15 P1.7/CAOUT/UCB0SIMO/UCB0SDA/A7/CA7/TDO/TDI, 16 ~{RST}/NMI/SBWTDIO, 17 TEST/SBWTCK, 18 XOUT/P2.7, 19 XIN/P2.6/TA0.1, 20 DVSS

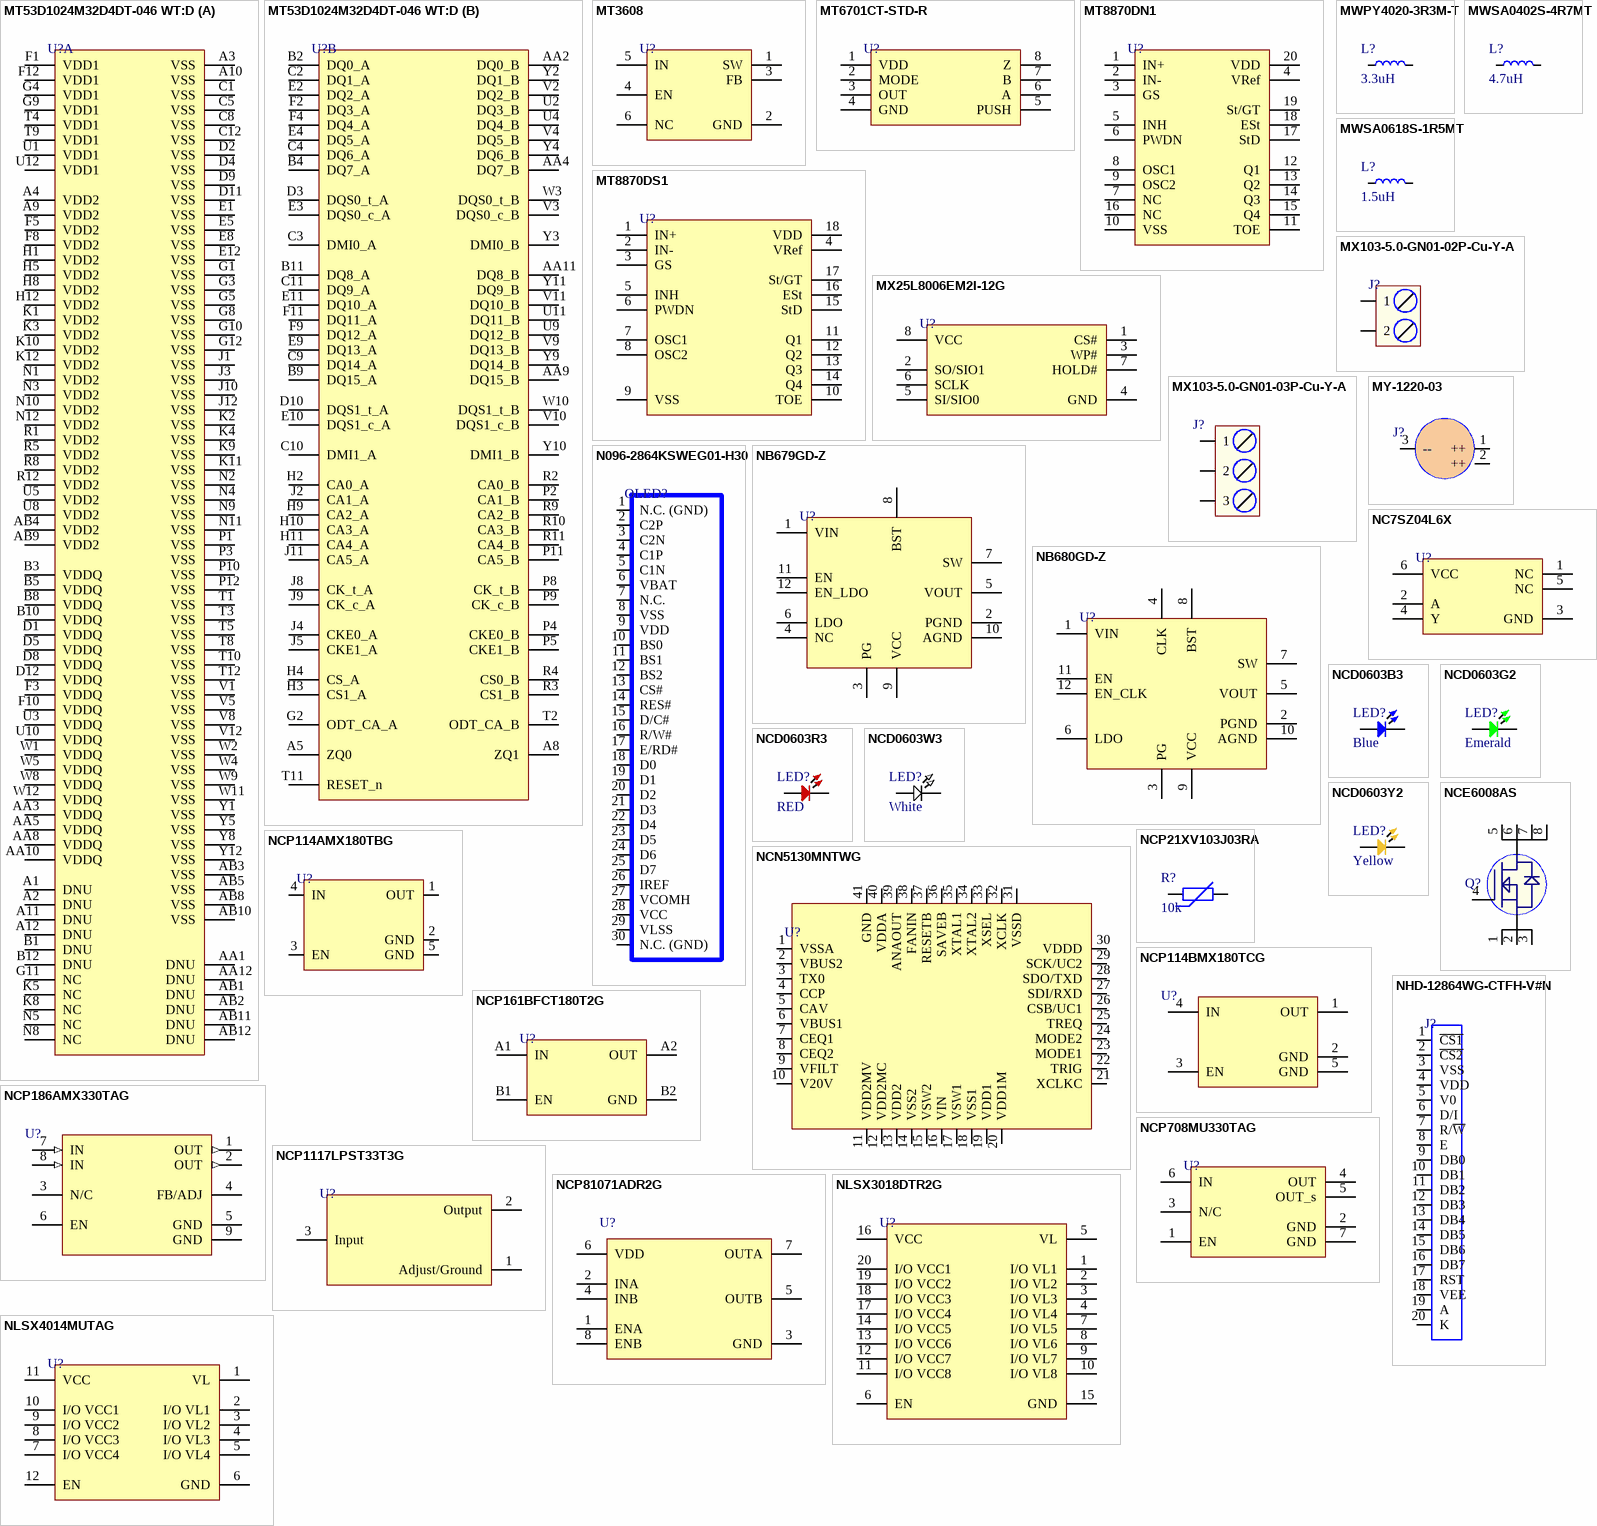
[diagram p17: symbols MT53D1024M32D4DT-046 WT:D to NLSX4014MUTAG]

## MT53D1024M32D4DT-046 WT:D
designator U?
VFBGA-200 DDR SDRAM ROHS; Manufacturer: Micron Tech; Manufacturer Part Number: MT53D1024M32D4DT-046 WT:D; Item Type: IC; Package: VFBGA-200; LCSC Part Number: C907715; ComponentLink1Description: LCSC; ComponentLink1URL: https://lcsc.com/product-detail/DDR-SDRAM_Micron-Tech-MT53D1024M32D4DT-046-WT-D_C907715.html
footprint FBGA-200_
part A pins: A1 DNU, A2 DNU, A3 VSS, A4 VDD2, A9 VDD2, A10 VSS, A11 DNU, A12 DNU, AA1 DNU, AA3 VDDQ, AA5 VDDQ, AA8 VDDQ, AA10 VDDQ, AA12 DNU, AB1 DNU, AB2 DNU, AB3 VSS, AB4 VDD2, AB5 VSS, AB8 VSS, AB9 VDD2, AB10 VSS, AB11 DNU, AB12 DNU, B1 DNU, B3 VDDQ, B5 VDDQ, B8 VDDQ, B10 VDDQ, B12 DNU, C1 VSS, C5 VSS, C8 VSS, C12 VSS, D1 VDDQ, D2 VSS, D4 VSS, D5 VDDQ, D8 VDDQ, D9 VSS, D11 VSS, D12 VDDQ, E1 VSS, E5 VSS, E8 VSS, E12 VSS, F1 VDD1, F3 VDDQ, F5 VDD2, F8 VDD2, F10 VDDQ, F12 VDD1, G1 VSS, G3 VSS, G4 VDD1, G5 VSS, G8 VSS, G9 VDD1, G10 VSS, G11 NC, G12 VSS, H1 VDD2, H5 VDD2, H8 VDD2, H12 VDD2, J1 VSS, J3 VSS, J10 VSS, J12 VSS, K1 VDD2, K2 VSS, K3 VDD2, K4 VSS, K5 NC, K8 NC, K9 VSS, K10 VDD2, K11 VSS, K12 VDD2, N1 VDD2, N2 VSS, N3 VDD2, N4 VSS, N5 NC, N8 NC, N9 VSS, N10 VDD2, N11 VSS, N12 VDD2, P1 VSS, P3 VSS, P10 VSS, P12 VSS, R1 VDD2, R5 VDD2, R8 VDD2, R12 VDD2, T1 VSS, T3 VSS, T4 VDD1, T5 VSS, T8 VSS, T9 VDD1, T10 VSS, T12 VSS, U1 VDD1, U3 VDDQ, U5 VDD2, U8 VDD2, U10 VDDQ, U12 VDD1, V1 VSS, V5 VSS, V8 VSS, V12 VSS, W1 VDDQ, W2 VSS, W4 VSS, W5 VDDQ, W8 VDDQ, W9 VSS, W11 VSS, W12 VDDQ, Y1 VSS, Y5 VSS, Y8 VSS, Y12 VSS
part B pins: A5 ZQ0, A8 ZQ1, AA2 DQ0_B, AA4 DQ7_B, AA9 DQ15_B, AA11 DQ8_B, B2 DQ0_A, B4 DQ7_A, B9 DQ15_A, B11 DQ8_A, C2 DQ1_A, C3 DMI0_A, C4 DQ6_A, C9 DQ14_A, C10 DMI1_A, C11 DQ9_A, D3 DQS0_t_A, D10 DQS1_t_A, E2 DQ2_A, E3 DQS0_c_A, E4 DQ5_A, E9 DQ13_A, E10 DQS1_c_A, E11 DQ10_A, F2 DQ3_A, F4 DQ4_A, F9 DQ12_A, F11 DQ11_A, G2 ODT_CA_A, H2 CA0_A, H3 CS1_A, H4 CS_A, H9 CA2_A, H10 CA3_A, H11 CA4_A, J2 CA1_A, J4 CKE0_A, J5 CKE1_A, J8 CK_t_A, J9 CK_c_A, J11 CA5_A, P2 CA1_B, P4 CKE0_B, P5 CKE1_B, P8 CK_t_B, P9 CK_c_B, P11 CA5_B, R2 CA0_B, R3 CS1_B, R4 CS0_B, R9 CA2_B, R10 CA3_B, R11 CA4_B, T2 ODT_CA_B, T11 RESET_n, U2 DQ3_B, U4 DQ4_B, U9 DQ12_B, U11 DQ11_B, V2 DQ2_B, V3 DQS0_c_B, V4 DQ5_B, V9 DQ13_B, V10 DQS1_c_B, V11 DQ10_B, W3 DQS0_t_B, W10 DQS1_t_B, Y2 DQ1_B, Y3 DMI0_B, Y4 DQ6_B, Y9 DQ14_B, Y10 DMI1_B, Y11 DQ9_B

## MT3608
designator U?
boost converterType 1 Boost 28V 2V~24V 1.2MHz SOT-23-6 DC-DC Converters ROHS; Manufacturer: XI'AN Aerosemi Tech; Manufacturer Part Number: MT3608; Item Type: IC; Package: SOT-23-6; LCSC Part Number: C84817; ComponentLink1Description: LCSC; ComponentLink1URL: https://www.lcsc.com/product-detail/DC-DC-Converters_XI-AN-Aerosemi-Tech-MT3608_C84817.html
footprint SOT-23-6
pins: 1 SW, 2 GND, 3 FB, 4 EN, 5 IN, 6 NC

## MT6701CT-STD-R
designator U?
SOP-8 Position Sensor ROHS; Manufacturer: Magn Tek; Manufacturer Part Number: MT6701CT-STD-R; Item Type: IC; Package: SOP-8; ComponentLink1Description: LCSC; ComponentLink1URL: https://www.lcsc.com/product-detail/Position-Sensor_Magn-Tek-MT6701CT-STD-R_C3003196.html; LCSC Part Number: C3003196
footprint SOP-8
pins: 1 VDD, 2 MODE, 3 OUT, 4 GND, 5 PUSH, 6 A, 7 B, 8 Z

## MT8870DN1
designator U?
IC TELECOM INTERFACE 20SSOP; Manufacturer: Microsemi; Manufacturer Part Number: MT8870DN1; Logic Function: Receiver; Number of Circuits: 1; Operating Supply Current: 3mA; Frequency: 3.58MHz; Operating Supply Voltage: 5V; Min Supply Voltage: 4.75V; Max Supply Voltage: 5.25V; Max Power Dissipation: 500mW; Supplier 1: Newark; RoHS: No; Category: Uncategorized; Mounting Technology: Surface Mount; Case/Package: SSOP; Pins: 20; Weight: 0.016oz; Min Operating Temperature: -40°C; Max Operating Temperature: 85°C; Packaging: Rail/Tube; Package Quantity: 660; Radiation Hardening: No; RoHS Compliant: No; ComponentLink1URL: https://datasheet.ciiva.com/29641/mt8870d-datasheet-oct2006-29641321.pdf?src-supplier=Digi-Key; ComponentLink1Description: https://datasheet.ciiva.com/29641/mt8870d-datasheet-oct2006-29641321.pdf?src-supplier=Digi-Key; Supplier Part Number 1: 03AH2719; LCSC Part Number: C1522106; Item Type: IC
footprint SSOP-20-5.2mm
pins: 1 IN+, 2 IN-, 3 GS, 4 VRef, 5 INH, 6 PWDN, 7 NC, 8 OSC1, 9 OSC2, 10 VSS, 11 TOE, 12 Q1, 13 Q2, 14 Q3, 15 Q4, 16 NC, 17 StD, 18 ESt, 19 St/GT, 20 VDD

## MT8870DS1
designator U?
IC TELECOM INTERFACE 18SOIC; Manufacturer: Microchip; Manufacturer Part Number: MT8870DS1; Supplier 1: Arrow Electronics; RoHS: Yes; Category: Interface ICs; Stock 1: 3900; Pricing 1: 1=4.2424, 10=3.8974, 25=3.5777, 50=3.381, 100=3.2039, 500=3.0498 (USD); ComponentLink1URL: http://www.microsemi.com/document-portal/doc_download/127041-mt8870d-datasheet-oct2006?src-supplier=Digi-Key; ComponentLink1Description: http://www.microsemi.com/document-portal/doc_download/127041-mt8870d-datasheet-oct2006?src-supplier=Digi-Key; Supplier Part Number 1: MT8870DS1; LCSC Part Number: C1522188; Item Type: IC
footprint SOIC-18
pins: 1 IN+, 2 IN-, 3 GS, 4 VRef, 5 INH, 6 PWDN, 7 OSC1, 8 OSC2, 9 VSS, 10 TOE, 11 Q1, 12 Q2, 13 Q3, 14 Q4, 15 StD, 16 ESt, 17 St/GT, 18 VDD

## MWPY4020-3R3M-T
designator L?, comment 3.3uH
1.4A 3.3uH ±20% 0.07Ω 3.2A SMD,4x4x2mm Power Inductors ROHS; Manufacturer: Me-TECH; Manufacturer Part Number: MWPY4020-3R3M-T; Footprint: Footprint; ComponentLink1Description: LCSC; ComponentLink1URL: https://lcsc.com/product-detail/Power-Inductors_Me-TECH-MWPY4020-3R3M-T_C2934994.html; LCSC Part Number: C2934994
footprint MWPY4020-3R3M-T_
pins: 1, 2

## MWSA0402S-4R7MT
designator L?, comment 4.7uH
Fixed Ind 4.7UH 2.8A 105MOHM SMD; Manufacturer: Sunlord; Manufacturer Part Number: MWSA0402S-4R7MT; Item Type: Inductor; Supplier 1: Digi-Key; RoHS: No; Category: Fixed Inductors; Stock 1: 2808; Pricing 1: 1=0.88000, 10=0.82100, 25=0.75760, 50=0.63120, 100=0.59340, 250=0.53024, 500=0.45450, 1000=0.40400 (USD); Supplier Part Number 1: 3442-MWSA0402S-4R7MTCT-ND; LCSC Part Number: C408337
footprint MWSA0402S-4R7MT
pins: 1, 2

## MWSA0618S-1R5MT
designator L?, comment 1.5uH
Fixed Ind 1.5UH 8A 26 Mohm SMD; Manufacturer: Sunlord; Manufacturer Part Number: MWSA0618S-1R5MT; Item Type: Inductor; Supplier 1: DigiKey; Stock 1: 1500; Pricing 1: 1=1.24000, 10=1.14900, 25=1.06040, 50=0.88380, 100=0.83070, 250=0.74236, 500=0.63630 (USD); Supplier Part Number 1: 3442-MWSA0618S-1R5MTCT-ND; LCSC Part Number: C408418; ComponentLink1Description: LCSC; ComponentLink1URL: https://www.lcsc.com/product-detail/Power-Inductors_Sunlord-MWSA0618S-1R5MT_C408418.html
footprint MWSA0618S-1R5MT
pins: 1, 2

## MX25L8006EM2I-12G
designator U?
IC FLASH 8MBIT SPI 86MHZ 8SOP; Manufacturer: Macronix; Manufacturer Part Number: MX25L8006EM2I-12G; Operating Supply Voltage: 3.6V; Density: 8Mb; Interface: SPI,Serial; Memory Type: Non-Volatile,FLASH; Supplier 1: Future Electronics; RoHS: Yes; Category: Flash; Stock 1: 5568; Pricing 1: 1=0.54000, 75=0.47500, 250=0.46000, 750=0.44500, 2500=0.43000 (USD); Mount: Surface Mount; Case/Package: SOIC; Min Operating Temperature: -40°C; Max Operating Temperature: 85°C; Max Frequency: 86MHz; Packaging: Rail/Tube; Package Quantity: 98; Frequency: 86MHz; Memory Size: 8Mb; Series: MX25xxx05/06; Supply Voltage-Nom: 3.6V; Lead Free: Lead Free; Temperature Grade: INDUSTRIAL; RoHS Compliant: Yes; ComponentLink1URL: http://ckassoc.com/oldsite/pdf/Macronix_Product_Line_Card_July_2017_General%20_070617.pdf?src-supplier=Digi-Key; ComponentLink1Description: http://ckassoc.com/oldsite/pdf/Macronix_Product_Line_Card_July_2017_General%20_070617.pdf?src-supplier=Digi-Key; ComponentLink2URL: http://www.macronix.com/Lists/DataSheet/Attachments/1610/MX25L8006E,%203V,%208Mb,%20v1.4.pdf?src-supplier=Future+Electronics; ComponentLink2Description: http://www.macronix.com/Lists/DataSheet/Attachments/1610/MX25L8006E,%203V,%208Mb,%20v1.4.pdf?src-supplier=Future+Electronics; Supplier Part Number 1: 1123114; LCSC Part Number: C71947; Item Type: IC
footprint SOP-8 (208 Mil)
pins: 1 CS#, 2 SO/SIO1, 3 WP#, 4 GND, 5 SI/SIO0, 6 SCLK, 7 HOLD#, 8 VCC

## MX103-5.0-GN01-02P-Cu-Y-A
designator J?
1x2P 10A -40℃~+105℃ 300V Green 12~24 Straight pin 5mm 2.5 1 2 Plugin,P=5mm Screw terminal ROHS; Manufacturer: MAX; Manufacturer Part Number: MX103-5.0-GN01-02P-Cu-Y-A; Package: Plugin,P=5mm; LCSC Part Number: C5188482; Item Type: Screw Terminal; ComponentLink1Description: LCSC; ComponentLink1URL: https://www.lcsc.com/product-detail/Screw-terminal_MAX-MX103-5-0-GN01-02P-Cu-Y-A_C5188482.html
footprint MX103-5.0-GN01-02P-Cu-Y-A
pins: 1, 2

## MX103-5.0-GN01-03P-Cu-Y-A
designator J?
1x3P 10A -40℃~+105℃ 300V Green 12~24 Straight pin 5mm 2.5 1 3 Plugin,P=5mm Screw terminal ROHS; Manufacturer: MAX; Manufacturer Part Number: MX103-5.0-GN01-03P-Cu-Y-A; Package: Plugin,P=5mm; LCSC Part Number: C5188483; ComponentLink1Description: LCSC; ComponentLink1URL: https://www.lcsc.com/product-detail/Screw-terminal_MAX-MX103-5-0-GN01-03P-Cu-Y-A_C5188483.html; Item Type: Screw Terminal
footprint MX103-5.0-GN01-03P-Cu-Y-A
pins: 1, 2, 3

## MY-1220-03
designator J?
Battery button CR1220 SMD Battery Connectors ROHS; Manufacturer: MYOUNG; Manufacturer Part Number: MY-1220-03; Item Type: Coin Cell Holder; Package: SMD; LCSC Part Number: C964818; ComponentLink1Description: LCSC; ComponentLink1URL: https://www.lcsc.com/product-detail/Battery-Connectors_MYOUNG-MY-1220-03_C964818.html
footprint MY-1220-03
pins: 1 ++, 2 ++, 3 --

## N096-2864KSWEG01-H30
designator OLED?
SSD1306 0.96 - OLED Displays Modules ROHS; Manufacturer: Newvisio; Manufacturer Part Number: N096-2864KSWEG01-H30; Package: -; LCSC Part Number: C2890596; Item Type: OLED; ComponentLink1Description: LCSC; ComponentLink1URL: https://www.lcsc.com/product-detail/span-style-background-color-ff0-OLED-span-Displays-Modules_Newvisio-N096-2864KSWEG01-H30_C2890596.html
footprint N096-2864KSWEG01-H30
pins: 1 N.C. (GND), 2 C2P, 3 C2N, 4 C1P, 5 C1N, 6 VBAT, 7 N.C., 8 VSS, 9 VDD, 10 BS0, 11 BS1, 12 BS2, 13 CS#, 14 RES#, 15 D/C#, 16 R/W#, 17 E/RD#, 18 D0, 19 D1, 20 D2, 21 D3, 22 D4, 23 D5, 24 D6, 25 D7, 26 IREF, 27 VCOMH, 28 VCC, 29 VLSS, 30 N.C. (GND)

## NB679GD-Z
designator U?
IC REG DL BUCK/LINEAR SYNC 12QFN; Manufacturer: Monolithic Power Systems; Manufacturer Part Number: NB679GD-Z; Supplier 1: Avnet; RoHS: Yes; Category: Power Supply Modules; RoHS Compliant: Yes; ComponentLink1URL: https://www.monolithicpower.com/pub/media/document/NB679_r1.03.pdf?src-supplier=Digi-Key; ComponentLink1Description: https://www.monolithicpower.com/pub/media/document/NB679_r1.03.pdf?src-supplier=Digi-Key; Supplier Part Number 1: NB679GD-Z; Item Type: IC
footprint 12-QFN (2x3)_
pins: 1 VIN, 2 PGND, 3 PG, 4 NC, 5 VOUT, 6 LDO, 7 SW, 8 BST, 9 VCC, 10 AGND, 11 EN, 12 EN_LDO

## NB680GD-Z
designator U?
Conv DC-DC Single Step Down 4.8V to 24V 12-Pin QFN T/R; Manufacturer: Monolithic Power Systems; Manufacturer Part Number: NB680GD-Z; Supplier 1: Avnet; RoHS: Yes; Category: Power Supply Modules; RoHS Compliant: Yes; Supplier Part Number 1: NB680GD-Z
footprint 12-QFN (2x3)_
pins: 1 VIN, 2 PGND, 3 PG, 4 CLK, 5 VOUT, 6 LDO, 7 SW, 8 BST, 9 VCC, 10 AGND, 11 EN, 12 EN_CLK

## NC7SZ04L6X
designator U?
IC INVERTER 1CH 1-INP 6MICROPAK; Manufacturer: ON Semiconductor / Fairchild; Manufacturer Part Number: NC7SZ04L6X; Max Supply Voltage: 5.5V; Min Supply Voltage: 1.65V; Number of Circuits: 1; High Level Output Current: -32mA; Low Level Output Current: 32mA; Propagation Delay: 12ns; Logic Function: Inverter,Buffer; Quiescent Current: 2uA; Turn-On Delay Time: 5.2ns; Schmitt Trigger Input: No; Supply Voltage-Nom: 3.6V; Supplier 1: Avnet; RoHS: Yes; Category: Logic Gates; Pricing 1: 5000=0.14415, 10000=0.14031, 20000=0.13646, 30000=0.13262, 40000=0.12877 (USD); Mount: Surface Mount; Number of Pins: 6; Weight: 30g; Min Operating Temperature: -40°C; Max Operating Temperature: 85°C; Packaging: Tape and Reel; Package Quantity: 5000; Number of Elements: 1; Number of Inputs: 1; Number of Gates: 1; Series: 7SZ; Technology: CMOS; Number of Functions: 1; Length: 1.45mm; Width: 1mm; Height: 0.5mm; Radiation Hardening: No; Lead Free: Lead Free; RoHS Compliant: Yes; ComponentLink1URL: https://datasheet.ciiva.com/26806/getdatasheetpartid-148648-26806951.pdf?src-supplier=Verical; ComponentLink1Description: https://datasheet.ciiva.com/26806/getdatasheetpartid-148648-26806951.pdf?src-supplier=Verical; ComponentLink2URL: https://datasheet.ciiva.com/8248/nc7sz04-8248827.pdf?src-supplier=Avnet; ComponentLink2Description: https://datasheet.ciiva.com/8248/nc7sz04-8248827.pdf?src-supplier=Avnet; ComponentLink3URL: https://datasheet.ciiva.com/17401/nc7sz04-17401000.pdf?src-supplier=Future+Electronics; ComponentLink3Description: https://datasheet.ciiva.com/17401/nc7sz04-17401000.pdf?src-supplier=Future+Electronics; ComponentLink4URL: https://datasheet.ciiva.com/18572/nc7sz04-18572351.pdf?src-supplier=Digi-Key; ComponentLink4Description: https://datasheet.ciiva.com/18572/nc7sz04-18572351.pdf?src-supplier=Digi-Key; Supplier Part Number 1: NC7SZ04L6X; LCSC Part Number: *; Item Type: IC
footprint 6-MICROPAk
pins: 1 NC, 2 A, 3 GND, 4 Y, 5 NC, 6 VCC

## NCD0603B3
designator LED?, comment Blue
blue 0603 Light Emitting Diodes (LED) ROHS; Manufacturer: Foshan NationStar Optoelectronics; Manufacturer Part Number: NCD0603B3; Package: 0603; LCSC Part Number: C158101; Item Type: LED; ComponentLink1Description: LCSC; ComponentLink1URL: https://www.lcsc.com/product-detail/Light-Emitting-Diodes-LED_Foshan-NationStar-Optoelectronics-NCD0603B3_C158101.html
footprint LED-0603
pins: 1, 2